# Altium footprint library aksima_footprint.PcbLib: 64 footprints (part 4 of 4)
Each footprint in its own frame and in the unit in brackets; x right, y up, seen from the top. Pads: shape width x height; smd on the part's side, far side on the other; paste and mask are expansions set on the pad; w line width, h text height; cw(c..) or ccw(c..) is an arc to the next point about the centre after c.
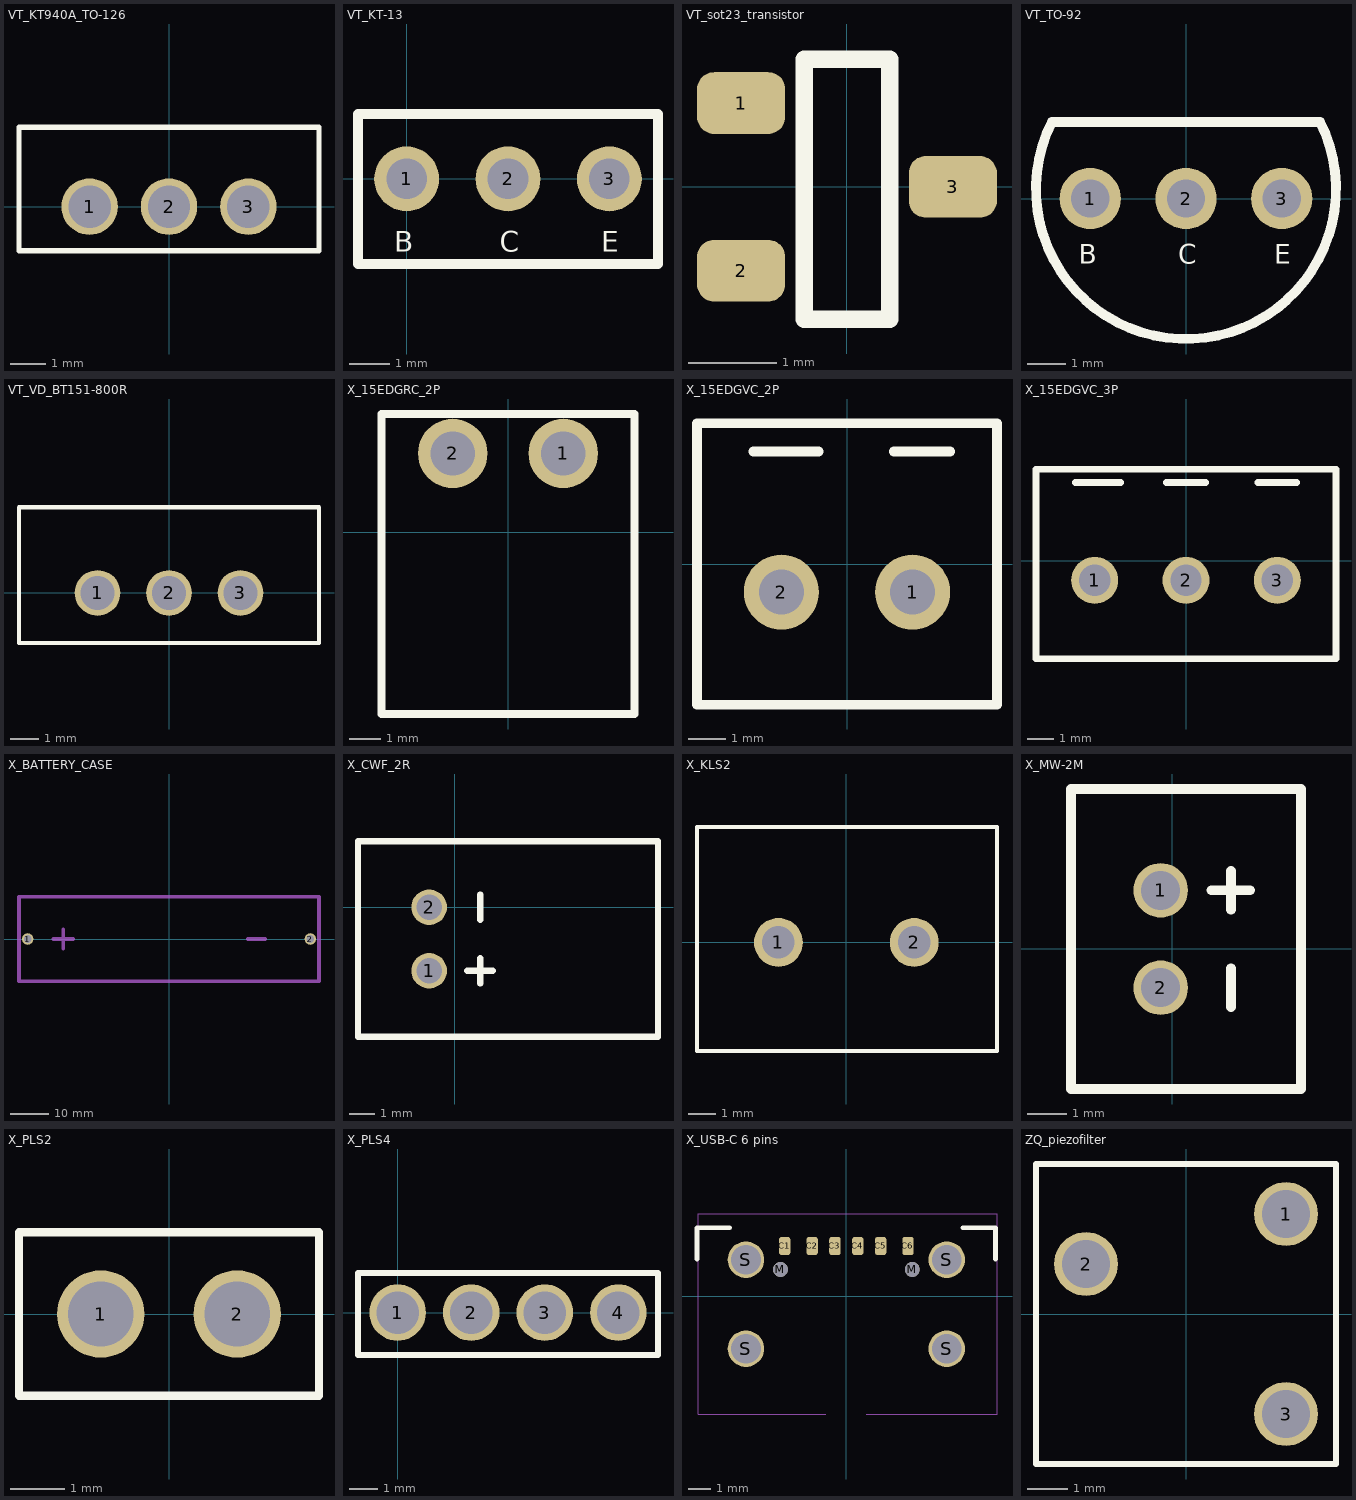
[diagram p3: the footprints below, top view; thin cyan lines are the x and y axes]

## VT_KT940A_TO-126 [mm] "Transistor footprint, KT940A TO-126"
pads (3):
  round 1.6 hole 1.2: 1(-2.25,0) 2(0,0) 3(2.25,0)
Top Overlay:
  lines w0.15: -4.25,-1.25 4.25,-1.25 4.25,2.25 -4.25,2.25 -4.25,-1.25
3D body "TO-126.step": height 13, standoff -14.1, extent -4,-1.1 4,2.15

## VT_KT-13 [mm] "Transistor footprint, KT-13"
pads (3):
  round 1.6 hole 1: 1(0,0) 2(2.5,0) 3(5,0)
Top Overlay:
  lines w0.254: -1.2,-2.1 6.2,-2.1 6.2,1.6 -1.2,1.6 -1.2,-2.1
  text "E" at 4.8,-1.8 h0.5
  text "C" at 2.3,-1.8 h0.5
  text "B" at -0.3,-1.8 h0.5
3D body "KT-13_1.STEP": height 7, standoff -4, extent -1.1,-1.5 6.1,1.5

## VT_sot23_transistor [mm] "Transistor footprint, sot23 transistor"
pads (3):
  rrect55% 1x0.7 smd: 1(-1.2,0.95) 2(-1.2,-0.95) 3(1.2,0)
Top Overlay:
  lines w0.2: -0.483,-1.499 -0.483,1.448 0.483,1.448 0.483,-1.499 -0.483,-1.499
  text "." at -2.134,1.502 h4.5
3D body "SOT23-3.STEP": height 1.29, standoff -0.01, extent -1.4,-1.45 1.4,1.45

## VT_TO-92 [mm] "Transistor footprint, TO-92"
pads (3):
  round 1.6 hole 1: 1(-2.5,0) 2(0,0) 3(2.5,0)
Top Overlay:
  lines w0.254: -3.5,2 ccw(c0,0.25) 3.5,2 -3.5,2
  text "B" at -2.8,-1.7 h0.5
  text "C" at -0.2,-1.7 h0.5
  text "E" at 2.3,-1.7 h0.5
3D body "TO-92_line_pin_2_5mm_pitch.stp": height 8.2, standoff -3, extent -2.75,-2.501 2.75,1.85

## VT_VD_BT151-800R [mm] "Transistor footprint, VD BT151-800R"
pads (3):
  round 1.6 hole 1.2 unplated: 1(-2.5,0) 2(0,0) 3(2.5,0)
Top Overlay:
  lines w0.15: -5.25,-1.75 5.25,-1.75 5.25,3 -5.25,3 -5.25,-1.75
3D body "TO220ShortLegs.SLDPRT": height 20, standoff -3, extent -5.16,-1.55 5.16,2.75

## X_15EDGRC_2P [mm] "2-position terminal connector, 15EDGRC series"
pads (2):
  round 2.2 hole 1.4: 1(1.75,2.5) 2(-1.75,2.5)
Top Overlay:
  lines w0.254: -4,-5.75 4,-5.75 4,3.75 -4,3.75 -4,-5.75
3D body "15EDGRC-3.5-02P-14-00AH.STEP": height 7.2, standoff -3.4, extent -3.9,-5.5 3.9,3.7

## X_15EDGVC_2P [mm] "2-position terminal connector, 15EDGVC series"
pads (2):
  round 2 hole 1.2: 1(1.75,-0.75) 2(-1.75,-0.75)
Top Overlay:
  lines w0.254: -2.5,3 -0.75,3 ; 1.25,3 2.75,3 ; -4,-3.75 4,-3.75 4,3.75 -4,3.75 -4,-3.75
3D body "15EDGVC-3.5-02P-14-00AH.STEP": height 9.2, standoff -3.4, extent -3.9,-3.7 3.9,3.5

## X_15EDGVC_3P [mm] "3-position terminal connector, 15EDGVC series"
pads (3):
  round 1.8 hole 1.2: 1(-3.5,-0.75) 2(0,-0.75) 3(3.5,-0.75)
Top Overlay:
  lines w0.254: -4.25,3 -2.5,3 ; -0.75,3 0.75,3 ; 2.75,3 4.25,3 ; -5.75,-3.75 5.75,-3.75 5.75,3.5 -5.75,3.5 -5.75,-3.75
3D body "15EDGVC-3.5-03P-14-00AH.STEP": height 9.2, standoff -3.4, extent -5.65,-3.75 5.65,3.45

## X_BATTERY_CASE [mm] "Connector footprint, BATTERY CASE"
pads (2):
  round 3 hole 2: 1(-36.75,0) 2(36.75,0)
Bottom 3D Body:
  lines w1: -39,10.5 -39,-11 39,-11 39,11 -39,11 ; -30,0 -25,0 ; -27.5,-2.5 -27.5,2.5 ; 20.5,0 25,0
3D body "Porta_18650.STEP": height 21, standoff -4, extent -38.5,-10 38.5,10

## X_CWF_2R [mm] "Connector footprint, CWF 2R"
pads (2):
  round 1.4 hole 1: 1(-1,-2.5) 2(-1,0)
Top Overlay:
  lines w0.254: 0.5,-2.5 1.5,-2.5 ; 1,-3 1,-2 ; 1,-0.5 1,0.5 ; -3.8,-5.1 8,-5.1 8,2.6 -3.8,2.6 -3.8,-5.1
3D body "DS1069-2 CWF-2R.stp": height 5.75, standoff -3.5, extent -3.62,-5 7.88,2.5

## X_KLS2 [mm] "Connector footprint, KLS2"
pads (2):
  round 1.8 hole 1.2: 1(-2.5,0) 2(2.5,0)
Top Overlay:
  lines w0.15: -5.5,-4 5.55,-4 5.55,4.25 -5.5,4.25 -5.5,-4
3D body "KF301-5-2P_blue.step": height 10.46, standoff -3.7, extent -5.15,-3.7 5.2,3.9

## X_MW-2M [mm] "Connector footprint, MW-2M"
pads (2):
  round 1.4 hole 1: 1(-0.3,1.5) 2(-0.3,-1)
Top Overlay:
  lines w0.254: 1,1.5 2,1.5 ; 1.5,-1.5 1.5,-0.5 ; 1.5,1 1.5,2 ; -2.6,-3.6 3.3,-3.6 3.3,4.1 -2.6,4.1 -2.6,-3.6
3D body "2 Pin RMC Header.step": height 7, standoff -2.87, extent -2.5,-3.55 3.2,3.95

## X_PLS2 [mm] "Connector footprint, PLS2"
pads (2):
  round 1.6 hole 1.2 unplated: 1(-1.25,0) 2(1.25,0)
Top Overlay:
  lines w0.15: -2.75,-1.5 2.75,-1.5 2.75,1.5 -2.75,1.5 -2.75,-1.5
3D body "PLS-2.step": height 9, standoff -2.5, extent -2.5,-1.202 2.55,1.202

## X_PLS4 [mm] "Connector footprint, PLS4"
pads (4):
  round 2 hole 1.5: 1(0,0) 2(2.6,0) 3(5.2,0) 4(7.8,0)
Top Overlay:
  lines w0.2: -1.4,-1.5 9.2,-1.5 9.2,1.4 -1.4,1.4 -1.4,-1.5
3D body "PLS-04.stp": height 8.2, standoff -3, extent -1.16,-1.298 9,1.2

## X_USB-C 6 pins [mm] "Connector footprint, USB-C 6 pins"
pads (12):
  rrect50% 0.5x0.8 smd: C1(-2.7,2.2) C2(-1.5,2.2) C3(-0.5,2.2) C4(0.5,2.2) C5(1.5,2.2) C6(2.7,2.2)
  round 0.65 hole 0.65 unplated: M(-2.89,1.175) M(2.89,1.175)
  round 1.6 hole 1.3: S(-4.4,-2.3) S(-4.4,1.6) S(4.4,-2.3) S(4.4,1.6)
Top Overlay:
  circle w0.1: c-4.4,-2.3 r0.7
  lines w0.2: -6.544,1.625 -6.544,3.002 -5.11,3.002 ; 5.1,3.002 6.534,3.002 6.534,1.625
Mechanical 15:
  lines w0.05: -0.899,-5.161 -6.5,-5.161 -6.5,3.602 6.6,3.602 6.6,-5.161 0.879,-5.161
3D body "USB_type_C_smd_6p.stp": height 3.2, standoff -1.27, extent -4.6,-5.25 4.6,2.7

## ZQ_piezofilter [mm] "Frequency filter footprint, piezofilter"
pads (3):
  round 1.6 hole 1.2: 1(2.5,2.5) 2(-2.5,1.25) 3(2.5,-2.5)
Top Overlay:
  lines w0.15: -3.75,-3.75 3.75,-3.75 3.75,3.75 -3.75,3.75 -3.75,0.25 -3.75,-3.75
3D body "Filter.stp": height 10, standoff -2.3, extent -3.6,-3.75 3.6,3.75